# Altium footprint library SYNCBOX_TST.PcbLib: 267 footprints (part 10 of 17)
Each footprint in its own frame and in the unit in brackets; x right, y up, seen from the top. Pads: shape width x height; smd on the part's side, far side on the other; paste and mask are expansions set on the pad; w line width, h text height; cw(c..) or ccw(c..) is an arc to the next point about the centre after c.
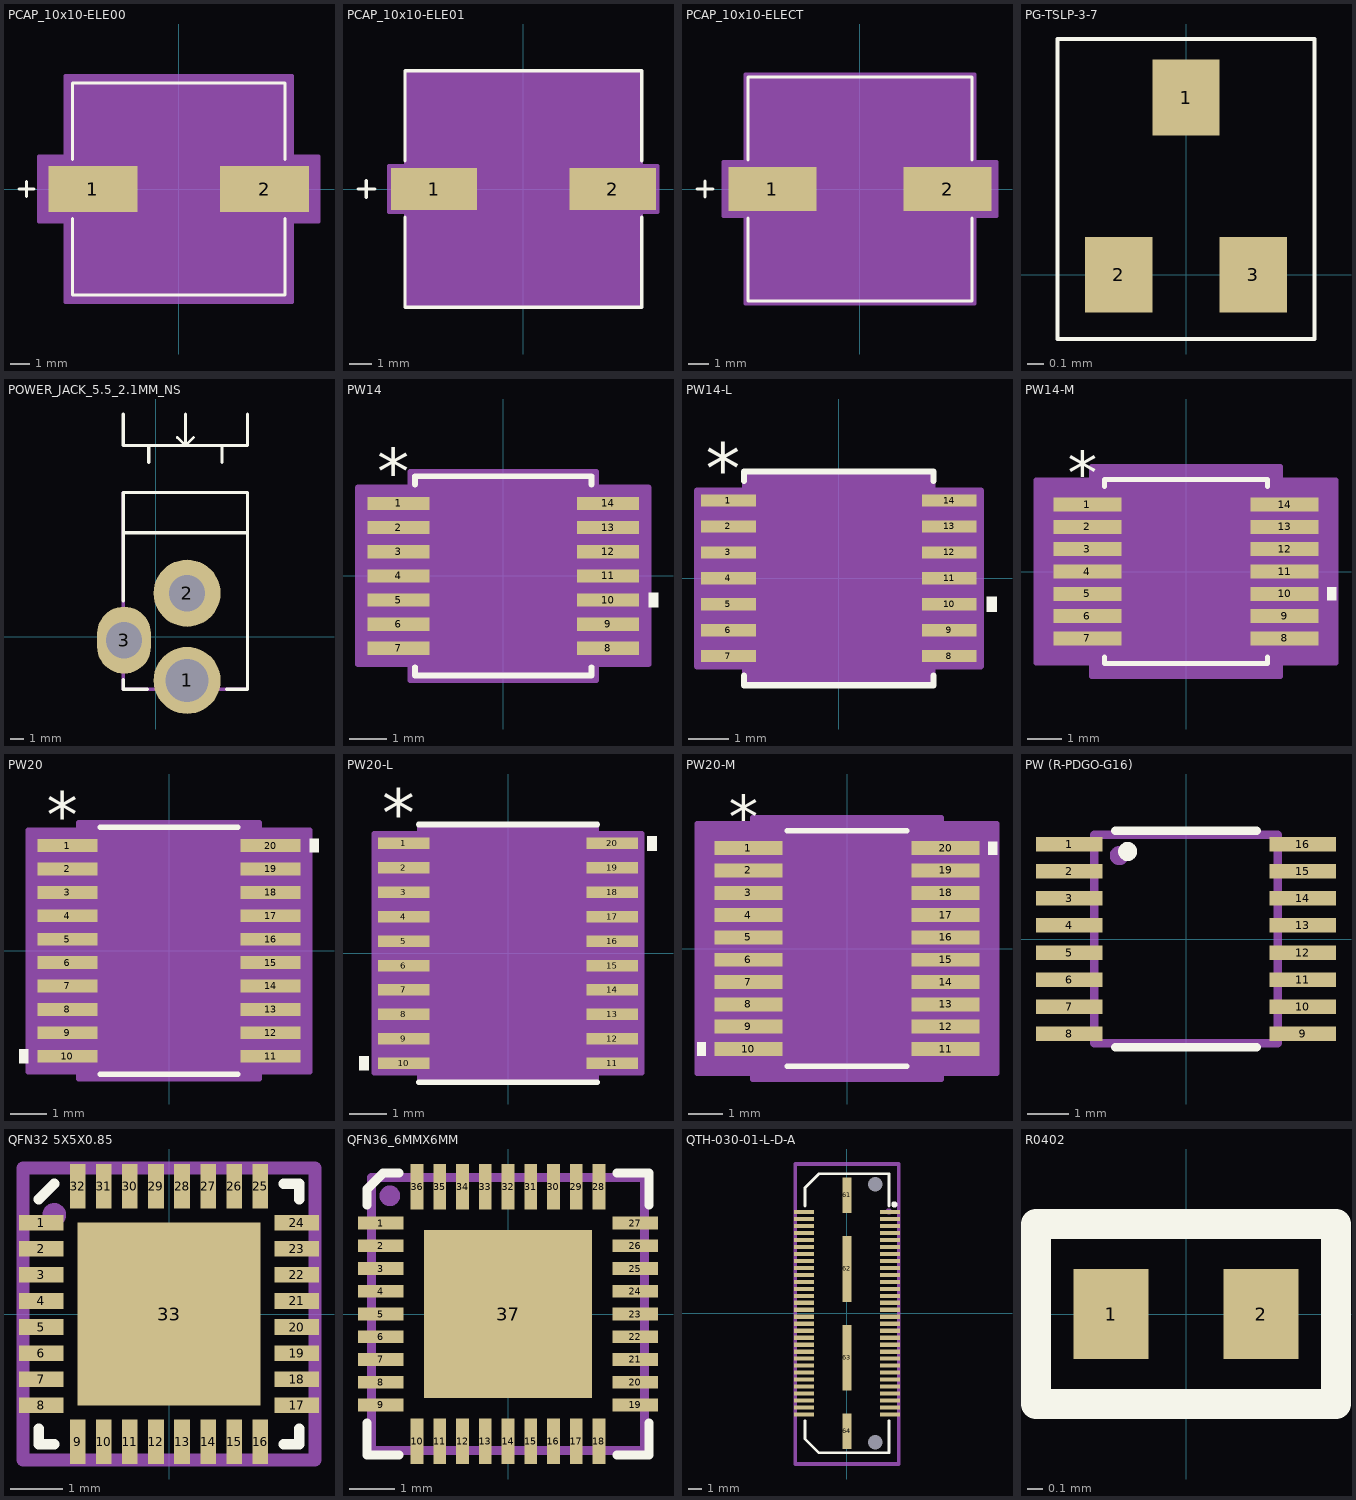
[diagram p9: the footprints below, top view; thin cyan lines are the x and y axes]

## PCAP_10x10-ELE00 [mil]
pads (2):
  rect 177x91 smd paste+0 mask+0: 1(-171,0) 2(171,0)
Top Overlay:
  lines w6: -318.5,0 -288.5,0 ; -303.5,-15 -303.5,15 ; -211.5,-58.6 -211.5,-211.5 211.5,-211.5 211.5,-58.6 ; -211.5,58.6 -211.5,211.5 211.5,211.5 211.5,58.6
Mechanical 13:
  lines w1: -318.5,0 -288.5,0 ; -303.5,-15 -303.5,15 ; -206.5,-103.25 -103.25,-206.5 ; -206.5,103.25 -103.25,206.5 ; -206.5,-206.5 -206.5,206.5 206.5,206.5 206.5,-206.5 -206.5,-206.5
Mechanical 15:
  region: -226.5,-65.5 -279.5,-65.5 -279.5,65.5 -226.5,65.5 -226.5,226.5 226.5,226.5 226.5,65.5 279.5,65.5 279.5,-65.5 226.5,-65.5 226.5,-226.5 -226.5,-226.5
  lines w6: -279.5,-65.5 -226.5,-65.5 -226.5,-226.5 226.5,-226.5 226.5,-65.5 279.5,-65.5 279.5,65.5 226.5,65.5 226.5,226.5 -226.5,226.5 -226.5,65.5 -279.5,65.5 -279.5,-65.5
3D body: height 10, standoff 0, extent 0,0 10,10
3D body "PCAP_10x10-ELECT.step": height 415.12, standoff 0, extent -220.51,-206.5 220.51,206.5

## PCAP_10x10-ELE01 [mil]
pads (2):
  rect 154x75 smd paste+0 mask+0: 1(-159.5,0) 2(159.5,0)
Top Overlay:
  lines w6: -295.5,0 -265.5,0 ; -280.5,-15 -280.5,15 ; -211.5,-50.6 -211.5,-211.5 211.5,-211.5 211.5,-50.6 ; -211.5,50.6 -211.5,211.5 211.5,211.5 211.5,50.6
Mechanical 13:
  lines w1: -295.5,0 -265.5,0 ; -280.5,-15 -280.5,15 ; -206.5,-103.25 -103.25,-206.5 ; -206.5,103.25 -103.25,206.5 ; -206.5,-206.5 -206.5,206.5 206.5,206.5 206.5,-206.5 -206.5,-206.5
Mechanical 15:
  region: -210.5,-41.5 -240.5,-41.5 -240.5,41.5 -210.5,41.5 -210.5,210.5 210.5,210.5 210.5,41.5 240.5,41.5 240.5,-41.5 210.5,-41.5 210.5,-210.5 -210.5,-210.5
  lines w6: -240.5,-41.5 -210.5,-41.5 -210.5,-210.5 210.5,-210.5 210.5,-41.5 240.5,-41.5 240.5,41.5 210.5,41.5 210.5,210.5 -210.5,210.5 -210.5,41.5 -240.5,41.5 -240.5,-41.5
3D body: height 10, standoff 0, extent 0,0 10,10
3D body "PCAP_10x10-ELECT-L.step": height 415.12, standoff 0, extent -220.51,-206.49 220.52,206.5

## PCAP_10x10-ELECT [mil]
pads (2):
  rect 166x83 smd paste+0 mask+0: 1(-165.5,0) 2(165.5,0)
Top Overlay:
  lines w6: -307.5,0 -277.5,0 ; -292.5,-15 -292.5,15 ; -211.5,-54.6 -211.5,-211.5 211.5,-211.5 211.5,-54.6 ; -211.5,54.6 -211.5,211.5 211.5,211.5 211.5,54.6
Mechanical 13:
  lines w1: -307.5,0 -277.5,0 ; -292.5,-15 -292.5,15 ; -206.5,-103.25 -103.25,-206.5 ; -206.5,103.25 -103.25,206.5 ; -206.5,-206.5 206.5,-206.5 206.5,206.5 -206.5,206.5 -206.5,-206.5
Mechanical 15:
  region: -216.5,-51.5 -258.5,-51.5 -258.5,51.5 -216.5,51.5 -216.5,216.5 216.5,216.5 216.5,51.5 258.5,51.5 258.5,-51.5 216.5,-51.5 216.5,-216.5 -216.5,-216.5
  lines w6: -258.5,-51.5 -258.5,51.5 -216.5,51.5 -216.5,216.5 216.5,216.5 216.5,51.5 258.5,51.5 258.5,-51.5 216.5,-51.5 216.5,-216.5 -216.5,-216.5 -216.5,-51.5 -258.5,-51.5
3D body: height 10, standoff 0, extent 0,0 10,10
3D body "PCAP_10x10-ELECT-M.step": height 415.12, standoff 0, extent -220.51,-206.49 220.52,206.5

## PG-TSLP-3-7 [mm]
pads (3):
  rect 0.4x0.45 smd: 1(0,1.05) 2(-0.4,0) 3(0.4,0)
Top Overlay:
  lines w0.025: -0.762,0.508 -0.762,0.381 ; -0.762,0.381 -0.762,1.397 0.762,1.397 0.762,-0.381 -0.762,-0.381 -0.762,0.381
3D body "User Library-SOT-723.STEP": height 0.45, standoff -0.01, extent -0.615,0.034 0.635,1.084

## POWER_JACK_5.5_2.1MM_NS [mm]
pads (3):
  round 5 hole 3.2: 1(2.35,-3.25)
  round 5 hole 2.7: 2(2.35,3.25)
  oval 4x5 hole 2.7: 3(-2.35,-0.25)
Top Overlay:
  lines w0.2: 1.625,14.85 2.225,14.25 ; 2.225,16.6 2.225,14.25 ; 2.825,14.85 2.225,14.25
  lines w0.254: -2.4,-3.2 -2.4,-3.9 -0.6,-3.9 ; -2.4,2.7 -2.4,10.75 6.85,10.75 6.85,-3.9 5.3,-3.9 ; -2.4,7.75 6.85,7.75 ; -2.4,16.6 -2.4,14.25 6.85,14.25 6.85,16.6 ; -0.5,13 -0.5,14.25 ; 4.95,13 4.95,14.25
Mechanical 16:
  lines w0.254: -2.4,-3.9 6.85,-3.9 6.85,10.75 -2.4,10.75 -2.4,-3.9
Mechanical 29:
  text ".Designator" at -0.27,1.34 h1.52
3D body "CUI-PJ-002AH.step": height 11, standoff -3.5, extent -2.55,-3.9 6.85,10.5

## PW14 [mil]
pads (14):
  rect 66x14 smd paste+0 mask+0: 1(-111,76.77) 2(-111,51.18) 3(-111,25.59) 4(-111,0) 5(-111,-25.59) 6(-111,-51.18) 7(-111,-76.77) 8(111,-76.77) 9(111,-51.18) 10(111,-25.59) 11(111,0) 12(111,25.59) 13(111,51.18) 14(111,76.77)
Top Overlay:
  region: 154,-18.09 164,-18.09 164,-33.09 154,-33.09
  lines w6: -93.5,-96.87 -93.5,-105.5 93.5,-105.5 93.5,-96.87 ; -93.5,96.87 -93.5,105.5 93.5,105.5 93.5,96.87
  text "*" at -133.5,85.77 h50
Mechanical 13:
  lines w0: -12,100.5 ccw(c0,100.5) 12,100.5
  lines w1: -130,-82.77 -130,-70.77 -88.5,-70.77 -88.5,-82.77 -130,-82.77 ; -130,-57.18 -130,-45.18 -88.5,-45.18 -88.5,-57.18 -130,-57.18 ; -130,-31.59 -130,-19.59 -88.5,-19.59 -88.5,-31.59 -130,-31.59 ; -130,-6 -130,6 -88.5,6 -88.5,-6 -130,-6 ; -130,19.59 -130,31.59 -88.5,31.59 -88.5,19.59 -130,19.59 ; -130,45.18 -130,57.18 -88.5,57.18 -88.5,45.18 -130,45.18 ; -130,70.77 -130,82.77 -88.5,82.77 -88.5,70.77 -130,70.77 ; -88.5,-100.5 88.5,-100.5 88.5,100.5 -88.5,100.5 -88.5,-100.5 ; 88.5,-82.77 88.5,-70.77 130,-70.77 130,-82.77 88.5,-82.77 ; 88.5,-57.18 88.5,-45.18 130,-45.18 130,-57.18 88.5,-57.18 ; 88.5,-31.59 88.5,-19.59 130,-19.59 130,-31.59 88.5,-31.59 ; 88.5,-6 88.5,6 130,6 130,-6 88.5,-6 ; 88.5,19.59 88.5,31.59 130,31.59 130,19.59 88.5,19.59 ; 88.5,45.18 88.5,57.18 130,57.18 130,45.18 88.5,45.18 ; 88.5,70.77 88.5,82.77 130,82.77 130,70.77 88.5,70.77
  text "*" at -86,47.5 h50
Mechanical 15:
  region: -98.5,-93.77 -154,-93.77 -154,93.77 -98.5,93.77 -98.5,110.5 98.5,110.5 98.5,93.77 154,93.77 154,-93.77 98.5,-93.77 98.5,-110.5 -98.5,-110.5
  lines w6: -154,-93.77 -154,93.77 -98.5,93.77 -98.5,110.5 98.5,110.5 98.5,93.77 154,93.77 154,-93.77 98.5,-93.77 98.5,-110.5 -98.5,-110.5 -98.5,-93.77 -154,-93.77
3D body: height 10, standoff 0, extent 0,0 10,10
3D body "PW14.step": height 47.09, standoff 0, extent -130,-100.51 130,100.51

## PW14-L [mil]
pads (14):
  rect 54x12 smd paste+0 mask+0: 1(-109,76.77) 2(-109,51.18) 3(-109,25.59) 4(-109,0) 5(-109,-25.59) 6(-109,-51.18) 7(-109,-76.77) 8(109,-76.77) 9(109,-51.18) 10(109,-25.59) 11(109,0) 12(109,25.59) 13(109,51.18) 14(109,76.77)
Top Overlay:
  region: 146,-18.09 156,-18.09 156,-33.09 146,-33.09
  lines w6: -93.5,-95.87 -93.5,-105.5 93.5,-105.5 93.5,-95.87 ; -93.5,95.87 -93.5,105.5 93.5,105.5 93.5,95.87
  text "*" at -131.5,83.77 h50
Mechanical 13:
  lines w0: -12,100.5 ccw(c0,100.5) 12,100.5
  lines w1: -130,-82.77 -88.5,-82.77 -88.5,-70.77 -130,-70.77 -130,-82.77 ; -130,-57.18 -88.5,-57.18 -88.5,-45.18 -130,-45.18 -130,-57.18 ; -130,-31.59 -88.5,-31.59 -88.5,-19.59 -130,-19.59 -130,-31.59 ; -130,-6 -88.5,-6 -88.5,6 -130,6 -130,-6 ; -130,19.59 -88.5,19.59 -88.5,31.59 -130,31.59 -130,19.59 ; -130,45.18 -88.5,45.18 -88.5,57.18 -130,57.18 -130,45.18 ; -130,70.77 -88.5,70.77 -88.5,82.77 -130,82.77 -130,70.77 ; -88.5,-100.5 -88.5,100.5 88.5,100.5 88.5,-100.5 -88.5,-100.5 ; 88.5,-82.77 130,-82.77 130,-70.77 88.5,-70.77 88.5,-82.77 ; 88.5,-57.18 130,-57.18 130,-45.18 88.5,-45.18 88.5,-57.18 ; 88.5,-31.59 130,-31.59 130,-19.59 88.5,-19.59 88.5,-31.59 ; 88.5,-6 130,-6 130,6 88.5,6 88.5,-6 ; 88.5,19.59 130,19.59 130,31.59 88.5,31.59 88.5,19.59 ; 88.5,45.18 130,45.18 130,57.18 88.5,57.18 88.5,45.18 ; 88.5,70.77 130,70.77 130,82.77 88.5,82.77 88.5,70.77
  text "*" at -86,47.5 h50
Mechanical 15:
  region: -92.5,-86.77 -140,-86.77 -140,86.77 -92.5,86.77 -92.5,104.5 92.5,104.5 92.5,86.77 140,86.77 140,-86.77 92.5,-86.77 92.5,-104.5 -92.5,-104.5
  lines w6: -140,-86.77 -92.5,-86.77 -92.5,-104.5 92.5,-104.5 92.5,-86.77 140,-86.77 140,86.77 92.5,86.77 92.5,104.5 -92.5,104.5 -92.5,86.77 -140,86.77 -140,-86.77
3D body "PW14-L.step": height 47.09, standoff 0, extent -130,-101.02 130,100
3D body: height 10, standoff 0, extent 0,0 10,10

## PW14-M [mil]
pads (14):
  rect 78x16 smd paste+0 mask+0: 1(-113,76.77) 2(-113,51.18) 3(-113,25.59) 4(-113,0) 5(-113,-25.59) 6(-113,-51.18) 7(-113,-76.77) 8(113,-76.77) 9(113,-51.18) 10(113,-25.59) 11(113,0) 12(113,25.59) 13(113,51.18) 14(113,76.77)
Top Overlay:
  region: 162,-18.09 172,-18.09 172,-33.09 162,-33.09
  lines w6: -93.5,-97.87 -93.5,-105.5 93.5,-105.5 93.5,-97.87 ; -93.5,97.87 -93.5,105.5 93.5,105.5 93.5,97.87
  text "*" at -135.5,87.77 h50
Mechanical 13:
  lines w0: -12,100.5 ccw(c0,100.5) 12,100.5
  lines w1: -130,-82.77 -130,-70.77 -88.5,-70.77 -88.5,-82.77 -130,-82.77 ; -130,-57.18 -130,-45.18 -88.5,-45.18 -88.5,-57.18 -130,-57.18 ; -130,-31.59 -130,-19.59 -88.5,-19.59 -88.5,-31.59 -130,-31.59 ; -130,-6 -130,6 -88.5,6 -88.5,-6 -130,-6 ; -130,19.59 -130,31.59 -88.5,31.59 -88.5,19.59 -130,19.59 ; -130,45.18 -130,57.18 -88.5,57.18 -88.5,45.18 -130,45.18 ; -130,70.77 -130,82.77 -88.5,82.77 -88.5,70.77 -130,70.77 ; -88.5,-100.5 88.5,-100.5 88.5,100.5 -88.5,100.5 -88.5,-100.5 ; 88.5,-82.77 88.5,-70.77 130,-70.77 130,-82.77 88.5,-82.77 ; 88.5,-57.18 88.5,-45.18 130,-45.18 130,-57.18 88.5,-57.18 ; 88.5,-31.59 88.5,-19.59 130,-19.59 130,-31.59 88.5,-31.59 ; 88.5,-6 88.5,6 130,6 130,-6 88.5,-6 ; 88.5,19.59 88.5,31.59 130,31.59 130,19.59 88.5,19.59 ; 88.5,45.18 88.5,57.18 130,57.18 130,45.18 88.5,45.18 ; 88.5,70.77 88.5,82.77 130,82.77 130,70.77 88.5,70.77
  text "*" at -86,47.5 h50
Mechanical 15:
  region: -108.5,-104.77 -172,-104.77 -172,104.77 -108.5,104.77 -108.5,120.5 108.5,120.5 108.5,104.77 172,104.77 172,-104.77 108.5,-104.77 108.5,-120.5 -108.5,-120.5
  lines w6: -172,-104.77 -172,104.77 -108.5,104.77 -108.5,120.5 108.5,120.5 108.5,104.77 172,104.77 172,-104.77 108.5,-104.77 108.5,-120.5 -108.5,-120.5 -108.5,-104.77 -172,-104.77
3D body: height 10, standoff 0, extent 0,0 10,10
3D body "PW14-M.step": height 47.09, standoff 0, extent -130,-100.51 130,100.51

## PW20 [mil]
pads (20):
  rect 66x14 smd paste+0 mask+0: 1(-111,115.16) 2(-111,89.57) 3(-111,63.98) 4(-111,38.39) 5(-111,12.8) 6(-111,-12.8) 7(-111,-38.39) 8(-111,-63.98) 9(-111,-89.57) 10(-111,-115.16) 11(111,-115.16) 12(111,-89.57) 13(111,-63.98) 14(111,-38.39) 15(111,-12.8) 16(111,12.8) 17(111,38.39) 18(111,63.98) 19(111,89.57) 20(111,115.16)
Top Overlay:
  region: 154,122.66 164,122.66 164,107.66 154,107.66
  region: -154,-107.66 -164,-107.66 -164,-122.66 -154,-122.66
  lines w6: -75.42,-135 75.42,-135 ; -75.42,135 75.42,135
  text "*" at -133.5,124.16 h50
Mechanical 13:
  lines w0: -12,130 ccw(c0,130) 12,130
  lines w1: -130,-121.16 -88.5,-121.16 -88.5,-109.16 -130,-109.16 -130,-121.16 ; -130,-95.57 -88.5,-95.57 -88.5,-83.57 -130,-83.57 -130,-95.57 ; -130,-69.98 -88.5,-69.98 -88.5,-57.98 -130,-57.98 -130,-69.98 ; -130,-44.39 -88.5,-44.39 -88.5,-32.39 -130,-32.39 -130,-44.39 ; -130,-18.8 -88.5,-18.8 -88.5,-6.8 -130,-6.8 -130,-18.8 ; -130,6.8 -88.5,6.8 -88.5,18.8 -130,18.8 -130,6.8 ; -130,32.39 -88.5,32.39 -88.5,44.39 -130,44.39 -130,32.39 ; -130,57.98 -88.5,57.98 -88.5,69.98 -130,69.98 -130,57.98 ; -130,83.57 -88.5,83.57 -88.5,95.57 -130,95.57 -130,83.57 ; -130,109.16 -88.5,109.16 -88.5,121.16 -130,121.16 -130,109.16 ; -88.5,-130 -88.5,130 88.5,130 88.5,-130 -88.5,-130 ; 88.5,-121.16 130,-121.16 130,-109.16 88.5,-109.16 88.5,-121.16 ; 88.5,-95.57 130,-95.57 130,-83.57 88.5,-83.57 88.5,-95.57 ; 88.5,-69.98 130,-69.98 130,-57.98 88.5,-57.98 88.5,-69.98 ; 88.5,-44.39 130,-44.39 130,-32.39 88.5,-32.39 88.5,-44.39 ; 88.5,-18.8 130,-18.8 130,-6.8 88.5,-6.8 88.5,-18.8 ; 88.5,6.8 130,6.8 130,18.8 88.5,18.8 88.5,6.8 ; 88.5,32.39 130,32.39 130,44.39 88.5,44.39 88.5,32.39 ; 88.5,57.98 130,57.98 130,69.98 88.5,69.98 88.5,57.98 ; 88.5,83.57 130,83.57 130,95.57 88.5,95.57 88.5,83.57 ; 88.5,109.16 130,109.16 130,121.16 88.5,121.16 88.5,109.16
  text "*" at -86,77 h50
Mechanical 15:
  region: -98.5,-132.16 -154,-132.16 -154,132.16 -98.5,132.16 -98.5,140 98.5,140 98.5,132.16 154,132.16 154,-132.16 98.5,-132.16 98.5,-140 -98.5,-140
  lines w6: -154,-132.16 -98.5,-132.16 -98.5,-140 98.5,-140 98.5,-132.16 154,-132.16 154,132.16 98.5,132.16 98.5,140 -98.5,140 -98.5,132.16 -154,132.16 -154,-132.16
3D body: height 10, standoff 0, extent 0,0 10,10
3D body "PW20.step": height 47.09, standoff 0, extent -130,-130 130,130

## PW20-L [mil]
pads (20):
  rect 54x12 smd paste+0 mask+0: 1(-109,115.16) 2(-109,89.57) 3(-109,63.98) 4(-109,38.39) 5(-109,12.8) 6(-109,-12.8) 7(-109,-38.39) 8(-109,-63.98) 9(-109,-89.57) 10(-109,-115.16) 11(109,-115.16) 12(109,-89.57) 13(109,-63.98) 14(109,-38.39) 15(109,-12.8) 16(109,12.8) 17(109,38.39) 18(109,63.98) 19(109,89.57) 20(109,115.16)
Top Overlay:
  region: 146,122.66 156,122.66 156,107.66 146,107.66
  region: -146,-107.66 -156,-107.66 -156,-122.66 -146,-122.66
  lines w6: -93.5,-135 93.5,-135 ; -93.5,135 93.5,135
  text "*" at -131.5,122.16 h50
Mechanical 13:
  lines w0: -12,130 ccw(c0,130) 12,130
  lines w1: -130,-121.16 -88.5,-121.16 -88.5,-109.16 -130,-109.16 -130,-121.16 ; -130,-95.57 -88.5,-95.57 -88.5,-83.57 -130,-83.57 -130,-95.57 ; -130,-69.98 -88.5,-69.98 -88.5,-57.98 -130,-57.98 -130,-69.98 ; -130,-44.39 -88.5,-44.39 -88.5,-32.39 -130,-32.39 -130,-44.39 ; -130,-18.8 -88.5,-18.8 -88.5,-6.8 -130,-6.8 -130,-18.8 ; -130,6.8 -88.5,6.8 -88.5,18.8 -130,18.8 -130,6.8 ; -130,32.39 -88.5,32.39 -88.5,44.39 -130,44.39 -130,32.39 ; -130,57.98 -88.5,57.98 -88.5,69.98 -130,69.98 -130,57.98 ; -130,83.57 -88.5,83.57 -88.5,95.57 -130,95.57 -130,83.57 ; -130,109.16 -88.5,109.16 -88.5,121.16 -130,121.16 -130,109.16 ; -88.5,-130 -88.5,130 88.5,130 88.5,-130 -88.5,-130 ; 88.5,-121.16 130,-121.16 130,-109.16 88.5,-109.16 88.5,-121.16 ; 88.5,-95.57 130,-95.57 130,-83.57 88.5,-83.57 88.5,-95.57 ; 88.5,-69.98 130,-69.98 130,-57.98 88.5,-57.98 88.5,-69.98 ; 88.5,-44.39 130,-44.39 130,-32.39 88.5,-32.39 88.5,-44.39 ; 88.5,-18.8 130,-18.8 130,-6.8 88.5,-6.8 88.5,-18.8 ; 88.5,6.8 130,6.8 130,18.8 88.5,18.8 88.5,6.8 ; 88.5,32.39 130,32.39 130,44.39 88.5,44.39 88.5,32.39 ; 88.5,57.98 130,57.98 130,69.98 88.5,69.98 88.5,57.98 ; 88.5,83.57 130,83.57 130,95.57 88.5,95.57 88.5,83.57 ; 88.5,109.16 130,109.16 130,121.16 88.5,121.16 88.5,109.16
  text "*" at -86,77 h50
Mechanical 15:
  region: -92.5,-125.16 -140,-125.16 -140,125.16 -92.5,125.16 -92.5,134 92.5,134 92.5,125.16 140,125.16 140,-125.16 92.5,-125.16 92.5,-134 -92.5,-134
  lines w6: -140,-125.16 -92.5,-125.16 -92.5,-134 92.5,-134 92.5,-125.16 140,-125.16 140,125.16 92.5,125.16 92.5,134 -92.5,134 -92.5,125.16 -140,125.16 -140,-125.16
3D body: height 10, standoff 0, extent 0,0 10,10
3D body "PW20-L.step": height 47.09, standoff 0, extent -130,-130 130,130

## PW20-M [mil]
pads (20):
  rect 78x16 smd paste+0 mask+0: 1(-113,115.16) 2(-113,89.57) 3(-113,63.98) 4(-113,38.39) 5(-113,12.8) 6(-113,-12.8) 7(-113,-38.39) 8(-113,-63.98) 9(-113,-89.57) 10(-113,-115.16) 11(113,-115.16) 12(113,-89.57) 13(113,-63.98) 14(113,-38.39) 15(113,-12.8) 16(113,12.8) 17(113,38.39) 18(113,63.98) 19(113,89.57) 20(113,115.16)
Top Overlay:
  region: 162,122.66 172,122.66 172,107.66 162,107.66
  region: -162,-107.66 -172,-107.66 -172,-122.66 -162,-122.66
  lines w6: -68.4,-135 68.4,-135 ; -68.4,135 68.4,135
  text "*" at -135.5,126.16 h50
Mechanical 13:
  lines w0: -12,130 ccw(c0,130) 12,130
  lines w1: -130,-121.16 -88.5,-121.16 -88.5,-109.16 -130,-109.16 -130,-121.16 ; -130,-95.57 -88.5,-95.57 -88.5,-83.57 -130,-83.57 -130,-95.57 ; -130,-69.98 -88.5,-69.98 -88.5,-57.98 -130,-57.98 -130,-69.98 ; -130,-44.39 -88.5,-44.39 -88.5,-32.39 -130,-32.39 -130,-44.39 ; -130,-18.8 -88.5,-18.8 -88.5,-6.8 -130,-6.8 -130,-18.8 ; -130,6.8 -88.5,6.8 -88.5,18.8 -130,18.8 -130,6.8 ; -130,32.39 -88.5,32.39 -88.5,44.39 -130,44.39 -130,32.39 ; -130,57.98 -88.5,57.98 -88.5,69.98 -130,69.98 -130,57.98 ; -130,83.57 -88.5,83.57 -88.5,95.57 -130,95.57 -130,83.57 ; -130,109.16 -88.5,109.16 -88.5,121.16 -130,121.16 -130,109.16 ; -88.5,-130 -88.5,130 88.5,130 88.5,-130 -88.5,-130 ; 88.5,-121.16 130,-121.16 130,-109.16 88.5,-109.16 88.5,-121.16 ; 88.5,-95.57 130,-95.57 130,-83.57 88.5,-83.57 88.5,-95.57 ; 88.5,-69.98 130,-69.98 130,-57.98 88.5,-57.98 88.5,-69.98 ; 88.5,-44.39 130,-44.39 130,-32.39 88.5,-32.39 88.5,-44.39 ; 88.5,-18.8 130,-18.8 130,-6.8 88.5,-6.8 88.5,-18.8 ; 88.5,6.8 130,6.8 130,18.8 88.5,18.8 88.5,6.8 ; 88.5,32.39 130,32.39 130,44.39 88.5,44.39 88.5,32.39 ; 88.5,57.98 130,57.98 130,69.98 88.5,69.98 88.5,57.98 ; 88.5,83.57 130,83.57 130,95.57 88.5,95.57 88.5,83.57 ; 88.5,109.16 130,109.16 130,121.16 88.5,121.16 88.5,109.16
  text "*" at -86,77 h50
Mechanical 15:
  region: -108.5,-143.16 -172,-143.16 -172,143.16 -108.5,143.16 -108.5,150 108.5,150 108.5,143.16 172,143.16 172,-143.16 108.5,-143.16 108.5,-150 -108.5,-150
  lines w6: -172,-143.16 -108.5,-143.16 -108.5,-150 108.5,-150 108.5,-143.16 172,-143.16 172,143.16 108.5,143.16 108.5,150 -108.5,150 -108.5,143.16 -172,143.16 -172,-143.16
3D body: height 10, standoff 0, extent 0,0 10,10
3D body "PW20-M.step": height 47.09, standoff 0, extent -130,-130 130,130

## PW (R-PDGO-G16) [mm]
pads (16):
  rect 1.6x0.35 smd mask+0.07: 1(-2.8,2.275) 2(-2.8,1.625) 3(-2.8,0.975) 4(-2.8,0.325) 5(-2.8,-0.325) 6(-2.8,-0.975) 7(-2.8,-1.625) 8(-2.8,-2.275) 9(2.8,-2.275) 10(2.8,-1.625) 11(2.8,-0.975) 12(2.8,-0.325) 13(2.8,0.325) 14(2.8,0.975) 15(2.8,1.625) 16(2.8,2.275)
Top Overlay:
  circle w0.254: c-1.4,2.1 r0.1
  lines w0.2: -1.7,-2.6 1.7,-2.6 ; -1.7,2.6 1.7,2.6
Mechanical 16:
  circle w0.254: c-1.6,2 r0.1
  lines w0.2: -2.2,-2.5 -2.2,2.5 2.2,2.5 2.2,-2.5 -2.2,-2.5
Mechanical 29:
  text ".Designator" at 0.7,0.5 h1
3D body "mtc16.stp": height 0.99, standoff -0.01, extent -3.198,-2.5 3.222,2.5

## QFN32 5X5X0.85 [mm]
pads (33):
  rect 0.85x0.3 smd mask+0.025: 1(-2.45,1.75) 2(-2.45,1.25) 3(-2.45,0.75) 4(-2.45,0.25) 5(-2.45,-0.25) 6(-2.45,-0.75) 7(-2.45,-1.25) 8(-2.45,-1.75) 17(2.45,-1.75) 18(2.45,-1.25) 19(2.45,-0.75) 20(2.45,-0.25) 21(2.45,0.25) 22(2.45,0.75) 23(2.45,1.25) 24(2.45,1.75)
  rect 0.3x0.85 smd mask+0.025: 9(-1.75,-2.45) 10(-1.25,-2.45) 11(-0.75,-2.45) 12(-0.25,-2.45) 13(0.25,-2.45) 14(0.75,-2.45) 15(1.25,-2.45) 16(1.75,-2.45) 25(1.75,2.45) 26(1.25,2.45) 27(0.75,2.45) 28(0.25,2.45) 29(-0.25,2.45) 30(-0.75,2.45) 31(-1.25,2.45) 32(-1.75,2.45)
  rect 3.5x3.5 smd paste-10 mask+0.025: 33(0,0)
Top Overlay:
  lines w0.2: -2.5,-2.2 -2.5,-2.5 -2.2,-2.5 ; -2.5,2.2 -2.2,2.5 ; 2.2,-2.5 2.5,-2.5 2.5,-2.2 ; 2.2,2.5 2.5,2.5 2.5,2.2
Top Paste:
  rectangle: -1.7,0.1 -0.1,1.7
  region: 0.1,1.7 0.1,0.1 1.7,0.1 1.7,1.7
  region: -0.1,-1.7 -0.1,-0.1 -1.7,-0.1 -1.7,-1.7
  region: 1.7,-0.1 0.1,-0.1 0.1,-1.7 1.7,-1.7
Mechanical 16:
  circle w0.254: c-2.2,1.9 r0.1
  lines w0.254: -2.8,-2.8 -2.8,2.8 2.8,2.8 2.8,-2.8 -2.8,-2.8
Mechanical 29:
  text ".Designator" at 0.5,-1.2 h1.2
3D body: height 0.9, standoff 0, extent -2.5,-2.5 2.5,2.5

## QFN36_6MMX6MM [mm]
pads (37):
  rect 1x0.28 smd mask+0.025: 1(-2.8,2) 2(-2.8,1.5) 3(-2.8,1) 4(-2.8,0.5) 5(-2.8,0) 6(-2.8,-0.5) 7(-2.8,-1) 8(-2.8,-1.5) 9(-2.8,-2) 19(2.8,-2) 20(2.8,-1.5) 21(2.8,-1) 22(2.8,-0.5) 23(2.8,0) 24(2.8,0.5) 25(2.8,1) 26(2.8,1.5) 27(2.8,2)
  rect 0.28x1 smd mask+0.025: 10(-2,-2.8) 11(-1.5,-2.8) 12(-1,-2.8) 13(-0.5,-2.8) 14(0,-2.8) 15(0.5,-2.8) 16(1,-2.8) 17(1.5,-2.8) 18(2,-2.8) 28(2,2.8) 29(1.5,2.8) 30(1,2.8) 31(0.5,2.8) 32(0,2.8) 33(-0.5,2.8) 34(-1,2.8) 35(-1.5,2.8) 36(-2,2.8)
  rect 3.7x3.7 smd paste-10 mask+0.025: 37(0,0)
Top Overlay:
  lines w0.2: -3.1,-2.4 -3.1,-3.1 -2.4,-3.1 ; -3.1,2.4 -3.1,2.75 -2.75,3.1 -2.4,3.1 ; 2.4,-3.1 3.1,-3.1 3.1,-2.4 ; 2.4,3.1 3.1,3.1 3.1,2.4
Top Paste:
  rectangle: -1.7,0.1 -0.1,1.7
  region: -0.1,-1.7 -0.1,-0.1 -1.7,-0.1 -1.7,-1.7
  region: 1.7,-0.1 0.1,-0.1 0.1,-1.7 1.7,-1.7
  region: 0.1,1.7 0.1,0.1 1.7,0.1 1.7,1.7
Mechanical 16:
  circle w0.254: c-2.6,2.6 r0.1
  lines w0.2: -3,-3 -3,3 3,3 3,-3 -3,-3
Mechanical 29:
  text ".Designator" at -1.2,-0.6 h1.2
3D body "QFN36 (6x6).step": height 0.9, standoff 0.01, extent -3.103,-3.103 3.102,3.102

## QTH-030-01-L-D-A [mm]
pads (66):
  rect 1.45x0.3 smd mask+0.025: 1(3.09,7.25) 2(-3.09,7.25) 3(3.09,6.75) 4(-3.09,6.75) 5(3.09,6.25) 6(-3.09,6.25) 7(3.09,5.75) 8(-3.09,5.75) 9(3.09,5.25) 10(-3.09,5.25) 11(3.09,4.75) 12(-3.09,4.75) 13(3.09,4.25) 14(-3.09,4.25) 15(3.09,3.75) 16(-3.09,3.75) 17(3.09,3.25) 18(-3.09,3.25) 19(3.09,2.75) 20(-3.09,2.75) 21(3.09,2.25) 22(-3.09,2.25) 23(3.09,1.75) 24(-3.09,1.75) 25(3.09,1.25) 26(-3.09,1.25) 27(3.09,0.75) 28(-3.09,0.75) 29(3.09,0.25) 30(-3.09,0.25) 31(3.09,-0.25) 32(-3.09,-0.25) 33(3.09,-0.75) 34(-3.09,-0.75) 35(3.09,-1.25) 36(-3.09,-1.25) 37(3.09,-1.75) 38(-3.09,-1.75) 39(3.09,-2.25) 40(-3.09,-2.25) 41(3.09,-2.75) 42(-3.09,-2.75) 43(3.09,-3.25) 44(-3.09,-3.25) 45(3.09,-3.75) 46(-3.09,-3.75) 47(3.09,-4.25) 48(-3.09,-4.25) 49(3.09,-4.75) 50(-3.09,-4.75) 51(3.09,-5.25) 52(-3.09,-5.25) 53(3.09,-5.75) 54(-3.09,-5.75) 55(3.09,-6.25) 56(-3.09,-6.25) 57(3.09,-6.75) 58(-3.09,-6.75) 59(3.09,-7.25) 60(-3.09,-7.25)
  rect 0.64x2.54 smd mask+0.025: 61(0,8.445) 64(0,-8.445)
  rect 0.64x4.7 smd mask+0.025: 62(0,3.175) 63(0,-3.175)
  round 0 hole 1.05 unplated: 65(2.03,-9.24) 66(2.03,9.24)
Top Overlay:
  circle w0.254: c3.4,7.8 r0.1
  lines w0.2: -3,-7.7 -3,-9 -2,-10 3,-10 3,-7.7 ; -3,7.7 -3,9 -2,10 3,10 3,7.7
Mechanical 16:
  circle w0.254: c3,7.3 r0.1
  lines w0.254: -3.7,-10.8 -3.7,10.7 3.7,10.7 3.7,-10.8 -3.7,-10.8
Mechanical 29:
  text ".Designator" at 1.2,0 h1.52
3D body "QTH-030-01-X-D-A.step": height 4.26, standoff -0.74, extent -3.55,-10.002 3.562,10

## R0402 [mm]
pads (2):
  rect 0.5x0.6 smd: 1(-0.5,0) 2(0.5,0)
Top Overlay:
  lines w0.2: -1,-0.6 1,-0.6 1,0.6 -1,0.6 -1,-0.6
Mechanical 16:
  lines w0.15: -1,-0.6 -1,0.6 1,0.6 1,-0.6 -1,-0.6
Mechanical 29:
  text ".Designator" at 2,0.2 h0.4
3D body "R0402.step": height 0.4, standoff 0, extent -0.5,-0.25 0.5,0.25